# Altium footprint library SamacSys.PcbLib: 1008 footprints (part 60 of 63)
Each footprint in its own frame and in the unit in brackets; x right, y up, seen from the top. Pads: shape width x height; smd on the part's side, far side on the other; paste and mask are expansions set on the pad; w line width, h text height; cw(c..) or ccw(c..) is an arc to the next point about the centre after c.
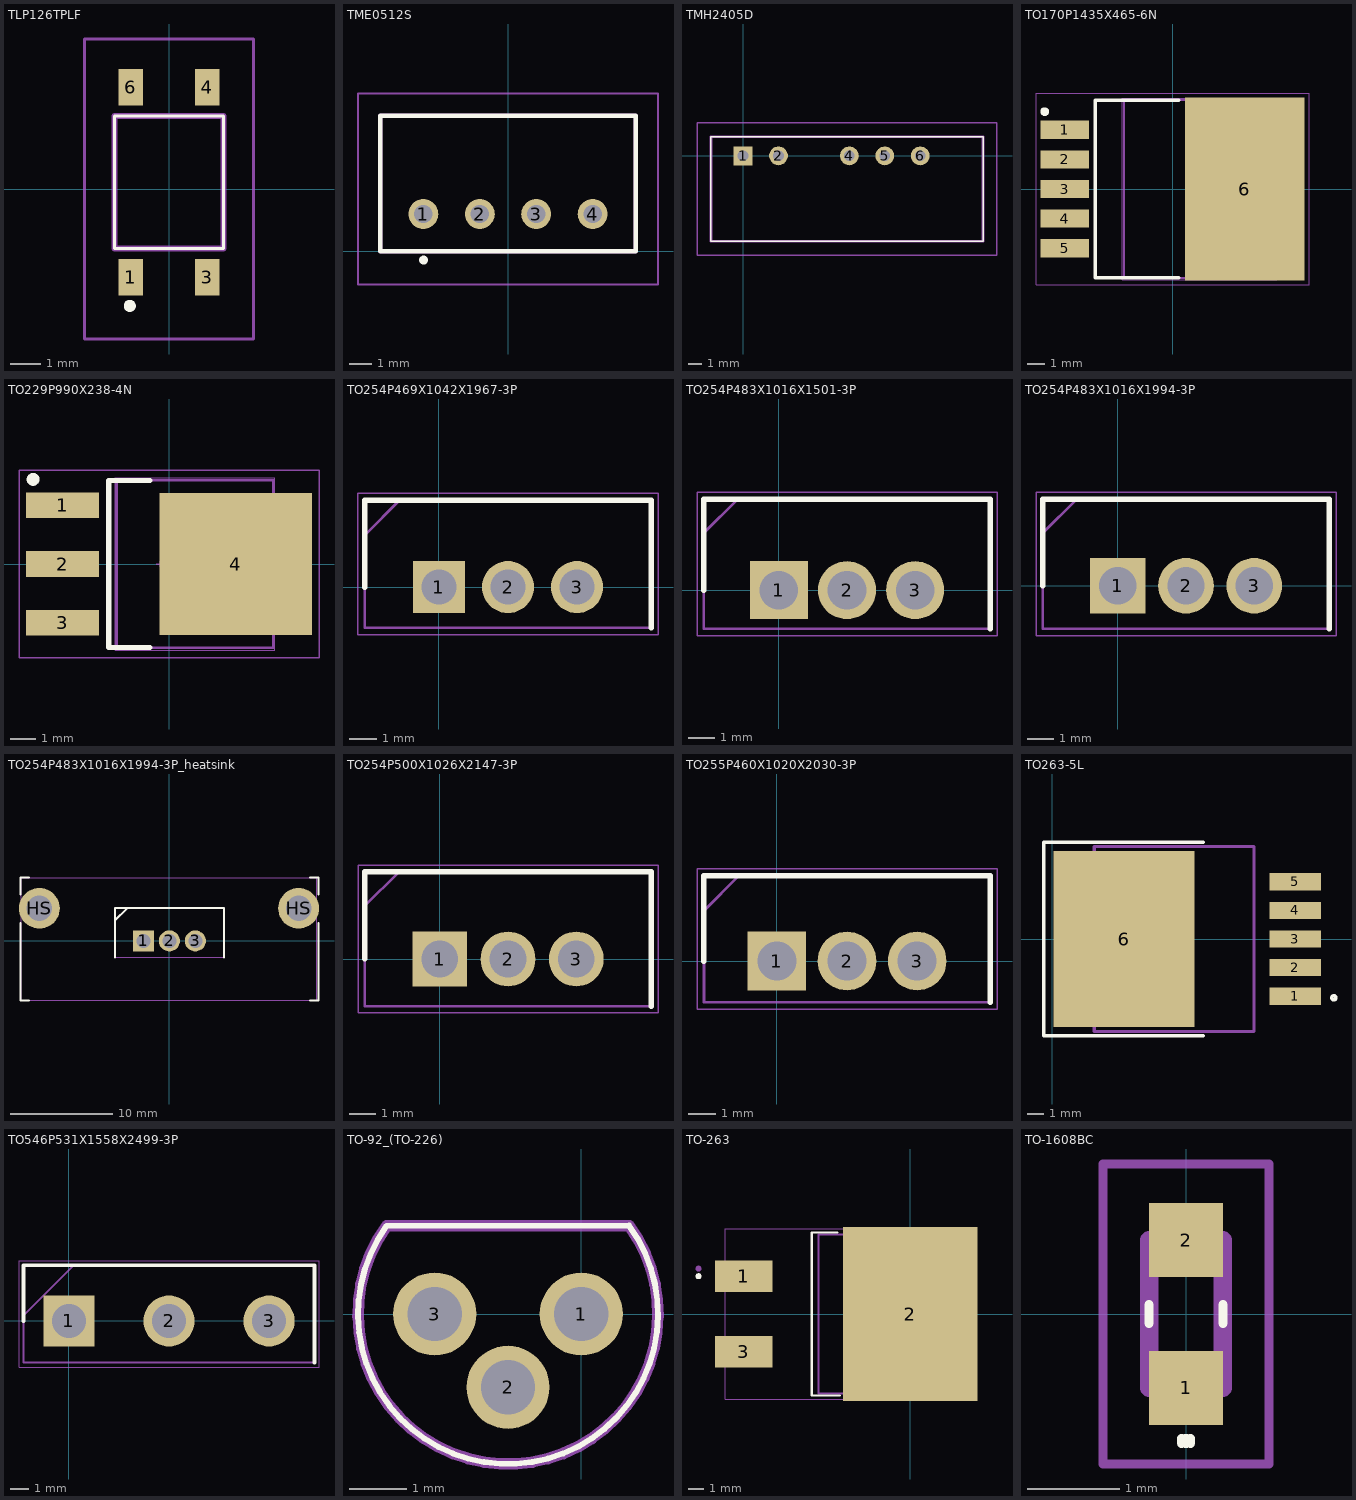
[diagram p59: the footprints below, top view; thin cyan lines are the x and y axes]

## TLP126TPLF [mm]
pads (4):
  rect 0.8x1.2 smd: 1(-1.27,-2.925) 3(1.27,-2.925) 4(1.27,3.375) 6(-1.27,3.375)
Top Overlay:
  lines w0.1: -1.8,-1.975 -1.8,2.425 1.8,2.425 1.8,-1.975 -1.8,-1.975
  lines w0.2: -1.4,-3.875 ccw(c-1.3,-3.875) -1.2,-3.875 ccw(c-1.3,-3.875) -1.4,-3.875
Assembly:
  lines w0.2: -1.8,-1.975 -1.8,2.425 1.8,2.425 1.8,-1.975 -1.8,-1.975
Countryard:
  lines w0.1: -2.8,-4.975 -2.8,4.975 2.8,4.975 2.8,-4.975 -2.8,-4.975

## TME0512S [mm]
pads (4):
  round 1.349 hole 0.83: 1(-3.81,1.675) 2(-1.27,1.675) 3(1.27,1.675) 4(3.81,1.675)
Top Overlay:
  lines w0.2: -5.75,0 -5.75,6.1 5.75,6.1 5.75,0 -5.75,0 ; -3.9,-0.4 ccw(c-3.8,-0.4) -3.7,-0.4 ccw(c-3.8,-0.4) -3.9,-0.4
Assembly:
  lines w0.2: -5.75,0 -5.75,6.1 5.75,6.1 5.75,0 -5.75,0
Countryard:
  lines w0.1: -6.75,-1.5 -6.75,7.1 6.75,7.1 6.75,-1.5 -6.75,-1.5
3D body "TME_1205S.stp": height 10, standoff -3.1, extent -5.7,0.048 5.7,6.048

## TMH2405D [mm]
pads (5):
  rect 1.349x1.349 hole 0.76: 1(0,0)
  round 1.349 hole 0.76: 2(2.54,0) 4(7.62,0) 5(10.16,0) 6(12.7,0)
Top Overlay:
  lines w0.1: -2.3,-6.125 -2.3,1.375 17.2,1.375 17.2,-6.125 -2.3,-6.125
Assembly:
  lines w0.2: -2.3,-6.125 -2.3,1.375 17.2,1.375 17.2,-6.125 -2.3,-6.125
Countryard:
  lines w0.1: -3.3,-7.125 -3.3,2.375 18.2,2.375 18.2,-7.125 -3.3,-7.125
3D body "TMH_2405D.stp": height 10.32, standoff -3.08, extent -2.11,-6.45 17.39,1.15

## TO170P1435X465-6N [mm]
pads (6):
  rect 2.8x1.05 smd: 1(-6.2,3.4) 2(-6.2,1.7) 3(-6.2,0) 4(-6.2,-1.7) 5(-6.2,-3.4)
  rect 6.85x10.5 smd: 6(4.15,0)
Top Overlay:
  circle w0.25: c-7.35,4.45 r0.125
  lines w0.2: 0.35,-5.1 -4.45,-5.1 -4.45,5.1 0.35,5.1
Assembly:
  lines w0.1: 5.905,-5.112 6.324,-5.112 7.175,-4.17 7.175,4.17 6.324,5.112 5.905,5.112 ; 5.905,-5.112 5.905,5.112 ; 5.905,-5.112 -2.785,-5.112 -2.785,5.112 5.905,5.112
Countryard:
  lines w0.001: -2.885,-5.205 -2.885,5.205 6.005,5.205 6.005,-5.205 -2.885,-5.205
  lines w0.05: -7.85,-5.5 -7.85,5.5 7.85,5.5 7.85,-5.5 -7.85,-5.5
3D body "LM2576S-12_NOPB.stp": height 4.72, standoff 0, extent -7.16,-5.08 7.14,5.08

## TO229P990X238-4N [mm]
pads (4):
  rect 2.85x1 smd: 1(-4.15,2.29) 2(-4.15,0) 3(-4.15,-2.29)
  rect 5.95x5.55 smd: 4(2.6,0)
Top Overlay:
  circle w0.25: c-5.3,3.3 r0.125
  lines w0.2: -0.75,-3.25 -2.35,-3.25 -2.35,3.25 -0.75,3.25
Assembly:
  lines w0.1: 4.062,-2.508 4.356,-2.508 4.952,-1.846 4.952,1.847 4.356,2.508 4.062,2.508 ; -2.032,-3.27 -2.032,3.27 4.062,3.27 4.062,-3.27 -2.032,-3.27
Countryard:
  circle w0.05: c0,0 r0.35
  lines w0.001: -2.095,-3.365 -2.095,3.365 4.125,3.365 4.125,-3.365 -2.095,-3.365
  lines w0.05: -0.5,0 0.5,0 ; 0,-0.5 0,0.5 ; -5.85,-3.65 -5.85,3.65 5.85,3.65 5.85,-3.65 -5.85,-3.65
3D body "NTD20N06LT4G.stp": height 2.39, standoff 0, extent -4.959,-3.27 4.959,3.27

## TO254P469X1042X1967-3P [mm]
pads (3):
  rect 1.92x1.92 hole 1.28: 1(0,0)
  round 1.92 hole 1.28: 2(2.54,0) 3(5.08,0)
Top Overlay:
  lines w0.2: -2.73,0 -2.73,3.195 7.81,3.195 7.81,-1.495
Assembly:
  lines w0.1: -2.73,1.925 -1.46,3.195 ; -2.73,-1.495 -2.73,3.195 7.81,3.195 7.81,-1.495 -2.73,-1.495
Countryard:
  lines w0.05: -2.98,-1.745 -2.98,3.445 8.06,3.445 8.06,-1.745 -2.98,-1.745
3D body "IRFZ44Z.stp": height 18.84, standoff -17.51, extent -2.668,-1.495 7.748,3.195

## TO254P483X1016X1501-3P [mm]
pads (3):
  rect 2.16x2.16 hole 1.44: 1(0,0)
  round 2.16 hole 1.44: 2(2.54,0) 3(5.08,0)
Top Overlay:
  lines w0.2: -2.795,0 -2.795,3.39 7.875,3.39 7.875,-1.44
Assembly:
  lines w0.1: -2.795,2.12 -1.525,3.39 ; -2.795,-1.44 7.875,-1.44 7.875,3.39 -2.795,3.39 -2.795,-1.44
Countryard:
  lines w0.05: -3.045,-1.69 8.125,-1.69 8.125,3.64 -3.045,3.64 -3.045,-1.69
3D body "IRF1405LPBF.stp": height 14.3, standoff -18.03, extent -2.54,-1.44 7.62,3.39

## TO254P483X1016X1994-3P [mm]
pads (3):
  rect 2.07x2.07 hole 1.38: 1(0,0)
  round 2.07 hole 1.38: 2(2.54,0) 3(5.08,0)
Top Overlay:
  lines w0.2: -2.795,0 -2.795,3.225 7.875,3.225 7.875,-1.605
Assembly:
  lines w0.1: -2.795,1.955 -1.525,3.225 ; -2.795,-1.605 -2.795,3.225 7.875,3.225 7.875,-1.605 -2.795,-1.605
Countryard:
  lines w0.05: -3.045,-1.855 -3.045,3.475 8.125,3.475 8.125,-1.855 -3.045,-1.855
3D body "IRF1405PBF.stp": height 18.86, standoff -17.4, extent -2.54,-1.605 7.62,3.225

## TO254P483X1016X1994-3P_heatsink [mm] "with SK29-38S heatsink"
pads (5):
  rect 2.07x2.07 hole 1.38: 1(-2.54,0)
  round 2.07 hole 1.38: 2(0,0) 3(2.54,0)
  round 4 hole 2.5 unplated: HS(-12.74,3.2) HS(12.66,3.2)
Top Overlay:
  lines w0.2: -14.605,1.778 -14.605,-5.842 -13.778,-5.842 ; -14.605,4.572 -14.605,6.223 -13.778,6.223 ; -5.34,2 -4.14,3.2 ; -5.335,-1.6 -5.335,3.225 5.335,3.225 5.335,-1.605 ; 13.778,-5.842 14.605,-5.842 14.605,1.778 ; 13.778,6.223 14.605,6.223 14.605,4.572
Assembly:
  lines w0.1: -5.335,1.955 -4.065,3.225 ; -5.335,-1.605 -5.335,3.225 5.335,3.225 5.335,-1.605 -5.335,-1.605
Countryard:
  lines w0.05: -14.54,-5.8 -14.54,6.2 14.46,6.2 14.46,-5.8 -14.54,-5.8
3D body "IRF1405PBF.stp": height 21.86, standoff -14.4, extent -5.08,-1.605 5.08,3.225
3D body "SK29-38S.STEP": height 38, standoff -4.5, extent -14.5,-5.842 14.5,6.158

## TO254P500X1026X2147-3P [mm]
pads (3):
  rect 2.04x2.04 hole 1.36: 1(0,0)
  round 2.04 hole 1.36: 2(2.54,0) 3(5.08,0)
Top Overlay:
  lines w0.2: -2.79,0 -2.79,3.245 7.87,3.245 7.87,-1.755
Assembly:
  lines w0.1: -2.79,1.975 -1.52,3.245 ; -2.79,-1.755 -2.79,3.245 7.87,3.245 7.87,-1.755 -2.79,-1.755
Countryard:
  lines w0.05: -3.04,-2.005 -3.04,3.495 8.12,3.495 8.12,-2.005 -3.04,-2.005
3D body "MBR16200CT.stp": height 20.12, standoff -7.77, extent -2.877,-1.7 7.957,2.88

## TO255P460X1020X2030-3P [mm]
pads (3):
  rect 2.13x2.13 hole 1.42: 1(0,0)
  round 2.13 hole 1.42: 2(2.55,0) 3(5.1,0)
Top Overlay:
  lines w0.2: -2.65,0 -2.65,3.1 7.75,3.1 7.75,-1.5
Assembly:
  lines w0.1: -2.65,1.825 -1.375,3.1 ; -2.65,-1.5 7.75,-1.5 7.75,3.1 -2.65,3.1 -2.65,-1.5
Countryard:
  lines w0.05: -2.9,-1.75 8,-1.75 8,3.35 -2.9,3.35 -2.9,-1.75
3D body "regulator TO-220.step": height 27, standoff -2, extent -2.6,-1.501 7.6,3

## TO263-5L [mm]
pads (6):
  rect 3.05x1.02 smd: 1(14.461,-3.4) 2(14.461,-1.7) 3(14.461,0) 4(14.461,1.7) 5(14.461,3.4)
  rect 8.38x10.49 smd: 6(4.286,0)
Top Overlay:
  circle w0.2: c16.75,-3.5 r0.126
  lines w0.2: 9,-5.75 -0.5,-5.75 -0.5,5.75 9,5.75
Assembly:
  lines w0.2: 2.5,-5.5 12,-5.5 12,5.5 2.5,5.5 2.5,-5.5
3D body "LM2596S-5.0_NOPB.stp": height 4.72, standoff 0, extent 1.39,-5.08 15.74,5.08

## TO546P531X1558X2499-3P [mm]
pads (3):
  rect 2.79x2.79 hole 1.86: 1(0,0)
  round 2.79 hole 1.86: 2(5.46,0) 3(10.92,0)
Top Overlay:
  lines w0.2: -2.475,0 -2.475,3.035 13.395,3.035 13.395,-2.275
Assembly:
  lines w0.1: -2.475,0.305 0.255,3.035 ; -2.475,-2.275 -2.475,3.035 13.395,3.035 13.395,-2.275 -2.475,-2.275
Countryard:
  lines w0.05: -2.725,-2.525 -2.725,3.285 13.645,3.285 13.645,-2.525 -2.725,-2.525
3D body "IRFP2907PBF.stp": height 24.2, standoff -40.41, extent -2.33,-2.275 13.25,3.035

## TO-92_(TO-226) [mm]
pads (3):
  round 1.44 hole 0.94: 1(0,0) 2(-1.27,-1.27) 3(-2.54,0)
Top Overlay:
  lines w0.1: -3.373,1.528 ccw(c-1.27,0) 0.831,1.532 ; -3.372,1.53 0.832,1.53
Assembly:
  lines w0.2: -3.373,1.528 ccw(c-1.27,0) 0.831,1.532 ; -3.372,1.53 0.832,1.53
3D body "BC547BG.stp": height 8.33, standoff -12.62, extent -3.869,-2.51 1.329,1.68

## TO-263 [mm] "D2PAK"
height 4.7
pads (3):
  rect 3.81x2.08 smd: 1(-11,2.5) 3(-11,-2.5)
  rect 8.9x11.5 smd paste-6: 2(0,0)
Top Overlay:
  circle w0.2: c-14,2.5 r0.1
  lines w0.15: -4.8,5.4 -6.5,5.4 -6.5,-5.4 -4.645,-5.4
Top Paste:
  region: 3.395,-5.115 1.775,-5.115 1.775,-3.885 3.395,-3.885
  region: 3.395,-3.315 1.775,-3.315 1.775,-2.085 3.395,-2.085
  region: 3.395,-1.515 1.775,-1.515 1.775,-0.285 3.395,-0.285
  region: 3.395,3.885 1.775,3.885 1.775,5.115 3.395,5.115
  region: 3.395,2.085 1.775,2.085 1.775,3.315 3.395,3.315
  region: 3.395,0.285 1.775,0.285 1.775,1.515 3.395,1.515
  region: 0.635,-5.115 -0.985,-5.115 -0.985,-3.885 0.635,-3.885
  region: 0.635,-3.315 -0.985,-3.315 -0.985,-2.085 0.635,-2.085
  region: 0.635,-1.515 -0.985,-1.515 -0.985,-0.285 0.635,-0.285
  region: 0.635,3.885 -0.985,3.885 -0.985,5.115 0.635,5.115
  region: 0.635,2.085 -0.985,2.085 -0.985,3.315 0.635,3.315
  region: 0.635,0.285 -0.985,0.285 -0.985,1.515 0.635,1.515
  region: -2.125,-5.115 -3.745,-5.115 -3.745,-3.885 -2.125,-3.885
  region: -2.125,-3.315 -3.745,-3.315 -3.745,-2.085 -2.125,-2.085
  region: -2.125,-1.515 -3.745,-1.515 -3.745,-0.285 -2.125,-0.285
  region: -2.125,3.885 -3.745,3.885 -3.745,5.115 -2.125,5.115
  region: -2.125,2.085 -3.745,2.085 -3.745,3.315 -2.125,3.315
  region: -2.125,0.285 -3.745,0.285 -3.745,1.515 -2.125,1.515
Assembly:
  circle w0.2: c-14,3 r0.1
  lines w0.127: -6.05,-5.25 -6.05,5.25 2.7,5.25 2.7,-5.25 -6.05,-5.25
Countryard:
  lines w0.05: -12.225,-5.65 4.225,-5.65 4.225,5.65 -12.225,5.65 -12.225,-5.65
3D body "step_temp.STEP": height 4.7, standoff 0, extent -11.62,-5.25 3.62,5.25

## TO-1608BC [mm]
pads (2):
  rect 0.8x0.8 smd: 1(0,-0.8) 2(0,0.8)
Top Overlay:
  lines w0.1: -0.4,-0.1 -0.4,0.1 ; -0.05,-1.4 cw(c0,-1.4) 0.05,-1.4 ; -0.05,-1.35 ccw(c0,-1.35) 0.05,-1.35 ; 0.4,-0.1 0.4,0.1
Assembly:
  lines w0.2: -0.4,-0.8 -0.4,0.8 0.4,0.8 0.4,-0.8 -0.4,-0.8
Countryard:
  lines w0.1: -0.9,-1.625 -0.9,1.625 0.9,1.625 0.9,-1.625 -0.9,-1.625
3D body "150060GS73220.stp": height 0.4, standoff 0, extent -0.4,-0.8 0.4,0.8